# Altium schematic symbol library Centralize.SchLib: 1081 symbols (part 11 of 26)
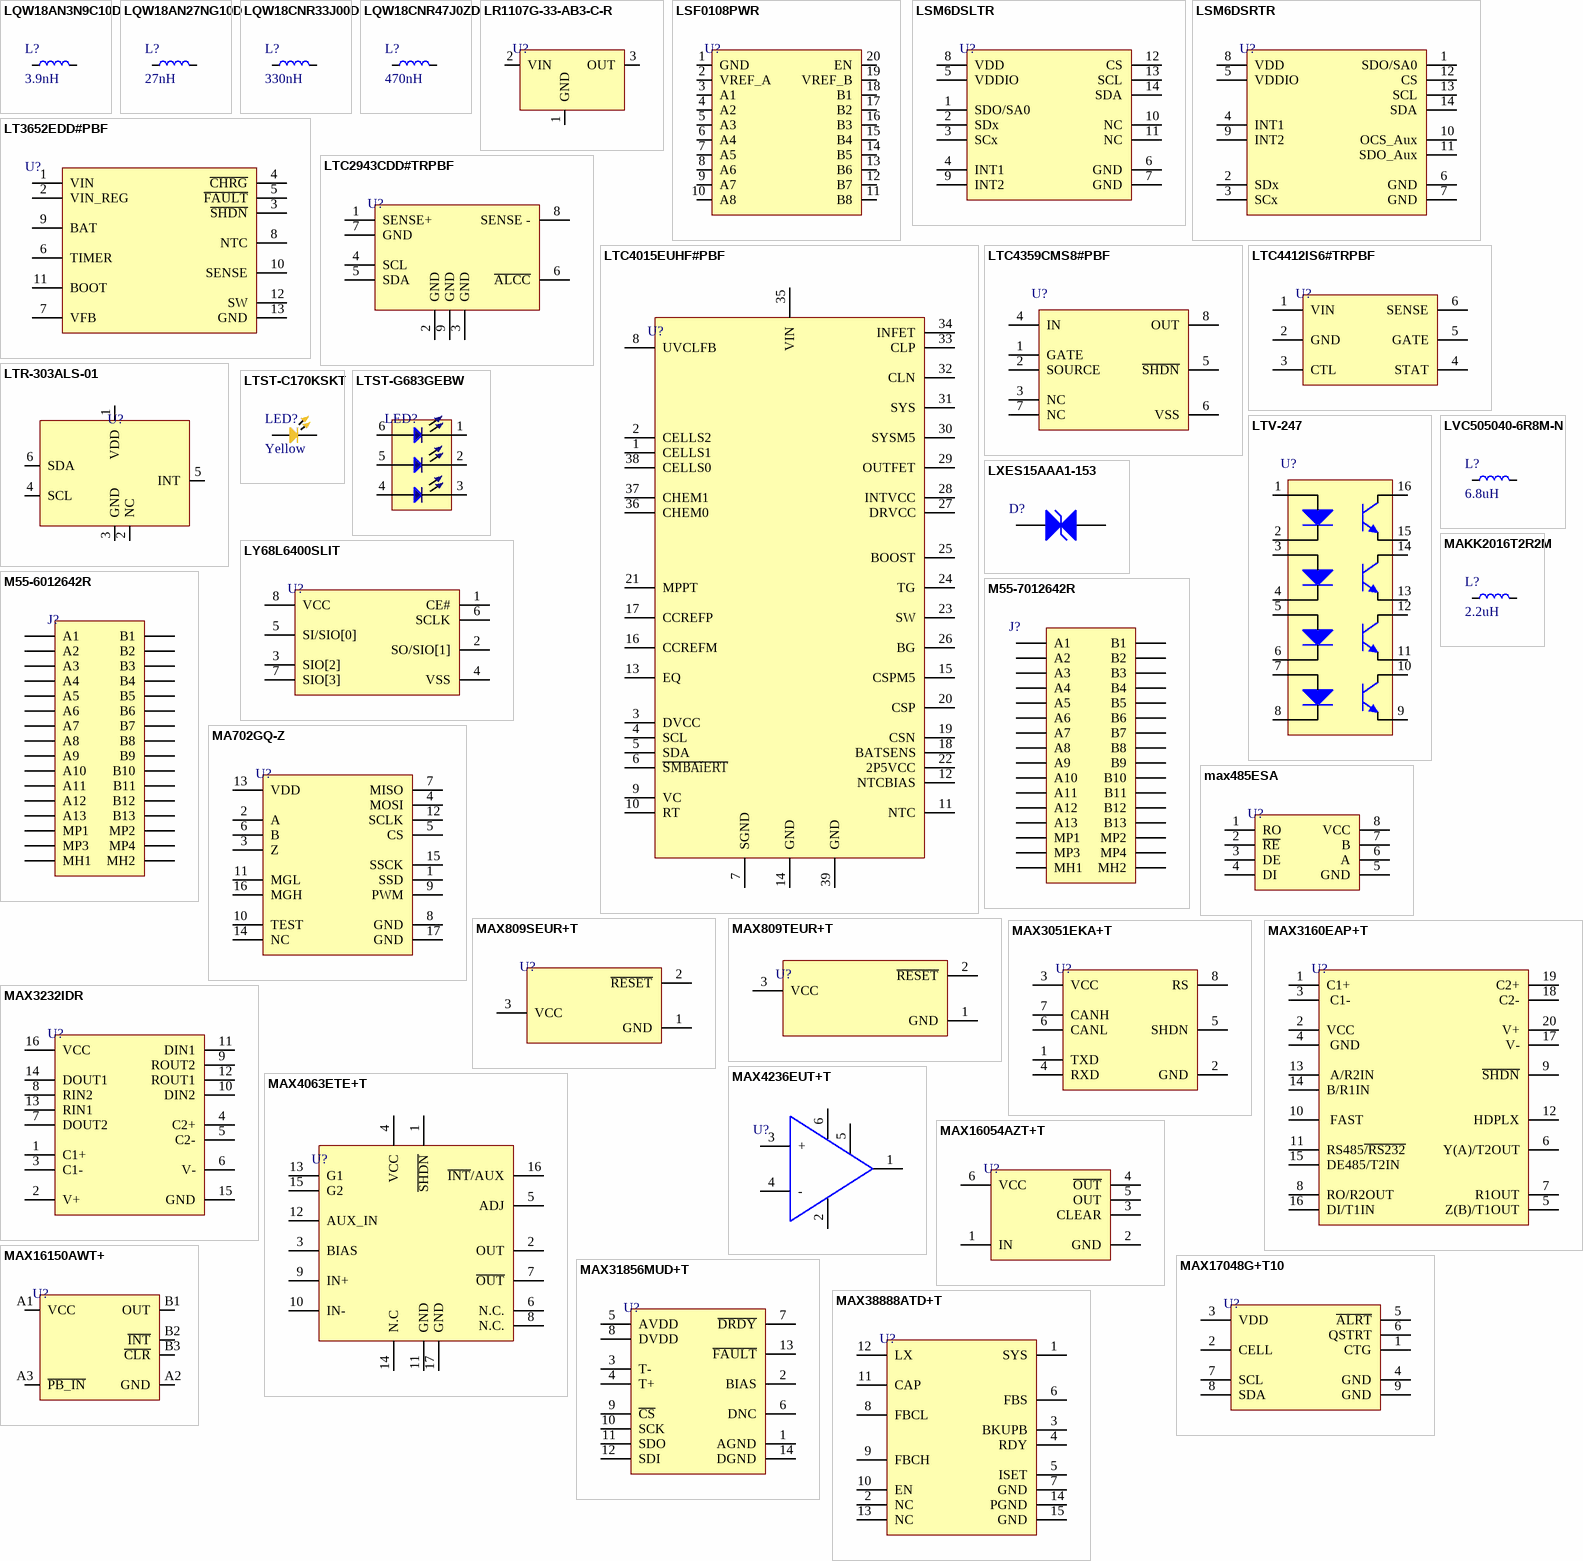
[diagram p57: symbols LQW18AN3N9C10D to MAX38888ATD+T]

## LQW18AN3N9C10D
designator L?, comment 3.9nH
FIXED IND 3.9NH 1A 32 MOHM SMD; Manufacturer: Murata; Manufacturer Part Number: LQW18AN3N9C10D; Core Material: Non-Magnetic; Shielding: Unshielded; Self Resonant Frequency: 11GHz; DC Resistance (DCR): 32mR; Q Factor: 38; Test Frequency: 100MHz; Item Type: Inductor; Supplier 1: RSComponents; RoHS: Yes; Category: Fixed Inductors; Stock 1: 1; Pricing 1: 10=0.16800 (USD); Mount: Surface Mount; Case/Package: 0603; Weight: 0.000106oz; Case Code (Metric): 1608; Case Code (Imperial): 0603; Min Operating Temperature: -55°C; Max Operating Temperature: 125°C; Packaging: Tape and Reel; Inductance: 3.9nH; Package Quantity: 4000; Current Rating: 1A; Resistor Type: Wirewound; Max DC Current: 1A; Termination: SMD/SMT; DC Current: 1A; Series: LQW18A_10; Length: 1.6mm; Width: 0.031inch; Height: 0.8mm; Height - Seated (Max): 0.039inch; Depth: 1.1mm; Radiation Hardening: No; REACH SVHC: No SVHC; Military Standard: Not; RoHS Compliant: Yes; ComponentLink1URL: https://datasheet.ciiva.com/11799/0900766b80a002db-11799288.pdf?src-supplier=RSComponents; ComponentLink1Description: https://datasheet.ciiva.com/11799/0900766b80a002db-11799288.pdf?src-supplier=RSComponents; ComponentLink2URL: https://datasheet.ciiva.com/6705/l0075s0080lqw18a-10-6705579.pdf?src-supplier=Digi-Key; ComponentLink2Description: https://datasheet.ciiva.com/6705/l0075s0080lqw18a-10-6705579.pdf?src-supplier=Digi-Key; ComponentLink3URL: https://datasheet.ciiva.com/6705/l0075s0080lqw18a-10-6705577.pdf?src-supplier=Digi-Key; ComponentLink3Description: https://datasheet.ciiva.com/6705/l0075s0080lqw18a-10-6705577.pdf?src-supplier=Digi-Key; ComponentLink4URL: https://datasheet.ciiva.com/6705/l0075s0080lqw18a-10-6705578.pdf?src-supplier=Digi-Key; ComponentLink4Description: https://datasheet.ciiva.com/6705/l0075s0080lqw18a-10-6705578.pdf?src-supplier=Digi-Key; ComponentLink5URL: https://datasheet.ciiva.com/4976/product-4976636.pdf?src-supplier=Mouser; ComponentLink5Description: https://datasheet.ciiva.com/4976/product-4976636.pdf?src-supplier=Mouser; Supplier Part Number 1: 7242951; LCSC Part Number: C521237
footprint IND-0603 (1608 Metric) (0.063" L x 0.032" W (1.60mm x 0.80mm))
pins: 1, 2

## LQW18AN27NG10D
designator L?, comment 27nH
FIXED IND 27NH 590MA 116MOHM SMD; Manufacturer: Murata; Manufacturer Part Number: LQW18AN27NG10D; Core Material: Non-Magnetic; Tolerance: 2%; DC Resistance (DCR): 116mR; Shielding: Unshielded; Self Resonant Frequency: 2.8GHz; Q Factor: 42; Test Frequency: 100MHz; Item Type: Inductor; Supplier 1: Arrow Electronics; RoHS: Yes; Category: Fixed Inductors; Stock 1: 3528; Pricing 1: 1=0.17550, 10=0.13260, 25=0.13120, 100=0.10470, 250=0.09530, 500=0.08580, 1000=0.07160, 3000=0.06500 (USD); Mount: Surface Mount; Case/Package: 0603; Weight: 0.000106oz; Case Code (Metric): 1608; Case Code (Imperial): 0603; Min Operating Temperature: -55°C; Max Operating Temperature: 125°C; Inductance: 27nH; Packaging: Tape and Reel; Max DC Current: 590mA; Inductance Tolerance: 2%; Package Quantity: 1; Current Rating: 590mA; Resistor Type: Wirewound; Termination: SMD/SMT; DC Current: 590mA; Series: LQW18A_10; Length: 1.6mm; Width: 0.031inch; Height: 0.8mm; Depth: 1.1mm; Height - Seated (Max): 0.039inch; Radiation Hardening: No; Lead Free: Lead Free; Military Standard: Not; Reach SVHC Compliant: Yes; RoHS Compliant: Yes; ComponentLink1URL: https://datasheet.ciiva.com/11799/0900766b80a002db-11799175.pdf?src-supplier=RSComponents; ComponentLink1Description: https://datasheet.ciiva.com/11799/0900766b80a002db-11799175.pdf?src-supplier=RSComponents; ComponentLink2URL: https://datasheet.ciiva.com/6705/l0075s0080lqw18a-10-6705574.pdf?src-supplier=Digi-Key; ComponentLink2Description: https://datasheet.ciiva.com/6705/l0075s0080lqw18a-10-6705574.pdf?src-supplier=Digi-Key; ComponentLink3URL: https://datasheet.ciiva.com/8507/l0075s0080lqw18a-10-8507510.pdf?src-supplier=Avnet; ComponentLink3Description: https://datasheet.ciiva.com/8507/l0075s0080lqw18a-10-8507510.pdf?src-supplier=Avnet; ComponentLink4URL: https://datasheet.ciiva.com/4978/product-4978252.pdf?src-supplier=Mouser; ComponentLink4Description: https://datasheet.ciiva.com/4978/product-4978252.pdf?src-supplier=Mouser; Supplier Part Number 1: LQW18AN27NG10D; LCSC Part Number: C701182
footprint IND-0603 (1608 Metric) (0.063" L x 0.032" W (1.60mm x 0.80mm))
pins: 1, 2

## LQW18CNR33J00D
designator L?, comment 330nH
0603 330nH ±5% DCR=250mΩ 630mA SRF=600MHz; Manufacturer: Murata; Manufacturer Part Number: LQW18CNR33J00D; Core Material: Ferrite; Self Resonant Frequency: 600MHz; Shielding: Unshielded; DC Resistance (DCR): 250mR; Test Frequency: 10MHz; Supplier 1: RSComponents; RoHS: Yes; Category: Fixed Inductors; Stock 1: 440; Pricing 1: 200=0.12100, 500=0.10900, 1000=0.09900, 2000=0.08900 (GBP); Mount: Surface Mount; Case/Package: 0603; Weight: 0.000141oz; Case Code (Metric): 1608; Case Code (Imperial): 0603; Min Operating Temperature: -40°C; Max Operating Temperature: 85°C; Tolerance: 5%; Packaging: Tape and Reel; Package Quantity: 4000; Current Rating: 630mA; Resistor Type: Wirewound; Inductance: 330nH; Max DC Current: 630mA; Termination: SMD/SMT; DC Current: 630mA; Inductance Tolerance: 5%; Series: LQW18C; Length: 0.063inch; Width: 0.031inch; Height: 0.8mm; Height - Seated (Max): 0.037inch; Depth: 0.95mm; REACH SVHC: No SVHC; Military Standard: Not; RoHS Compliant: Yes; ComponentLink1URL: https://datasheet.ciiva.com/8508/l0075s0093lqw18c-8508566.pdf?src-supplier=Avnet; ComponentLink1Description: https://datasheet.ciiva.com/8508/l0075s0093lqw18c-8508566.pdf?src-supplier=Avnet; ComponentLink2URL: https://datasheet.ciiva.com/29691/o05e-29691902.pdf?src-supplier=Digi-Key; ComponentLink2Description: https://datasheet.ciiva.com/29691/o05e-29691902.pdf?src-supplier=Digi-Key; Supplier Part Number 1: 1065371P
footprint IND-0603 (1608 Metric) (0.063" L x 0.032" W (1.60mm x 0.80mm))
pins: 1, 2

## LQW18CNR47J0ZD
designator L?, comment 470nH
FIXED IND 470NH 500MA 450MOHM SM; Manufacturer: Murata; Manufacturer Part Number: LQW18CNR47J0ZD; Core Material: Ferrite; Tolerance: 5%; Shielding: Unshielded; DC Resistance (DCR): 450mR; Self Resonant Frequency: 555MHz; Test Frequency: 10MHz; Item Type: Inductor; Supplier: Digi-Key; Supplier Part Number: 490-LQW18CNR47J0ZDCT-ND; RoHS: Yes; Category: Fixed Inductors; Stock: 4304; Pricing: 1=0.53, 10=0.46, 25=0.4268, 50=0.361, 100=0.3282, 250=0.30856, 500=0.27572, 1000=0.22321 (USD); Mounting Technology: Surface Mount; Case/Package: 0603; Min Operating Temperature: -40°C; Max Operating Temperature: 125°C; Series: LQW18; Value: 470nH; Ratings: AEC-Q200; RoHS Compliant: Yes; ComponentLink1URL: https://search.murata.co.jp/Ceramy/image/img/P02/JELF243A-9145.pdf?src-supplier=Digi-Key; ComponentLink1Description: https://search.murata.co.jp/Ceramy/image/img/P02/JELF243A-9145.pdf?src-supplier=Digi-Key; ComponentLink2URL: https://datasheet.octopart.com/LQW18CNR47J0ZD-Murata-datasheet-150573715.pdf?src-supplier=Newark; ComponentLink2Description: https://datasheet.octopart.com/LQW18CNR47J0ZD-Murata-datasheet-150573715.pdf?src-supplier=Newark; LCSC Part Number: C560039
footprint IND-0603 (1608 Metric) (0.063" L x 0.032" W (1.60mm x 0.80mm))
pins: 1, 2

## LR1107G-33-AB3-C-R
designator U?
600mA 60dB Fixed 3.3V~3.3V Positive 7V SOT-89-3 Linear Voltage Regulators (LDO) ROHS; Manufacturer: UTC(Unisonic Tech); Manufacturer Part Number: LR1107G-33-AB3-C-R; Item Type: IC; Package: SOT-89-3; ComponentLink1Description: LCSC; ComponentLink1URL: https://www.lcsc.com/product-detail/Linear-Voltage-Regulators-LDO_UTC-Unisonic-Tech-LR1107G-33-AB3-C-R_C171498.html; LCSC Part Number: C171498
footprint SOT-89-3
pins: 1 GND, 2 VIN, 3 OUT

## LSF0108PWR
designator U?
IC TRANSLATOR BIDIR 20TSSOP; Manufacturer: Texas Instruments; Manufacturer Part Number: LSF0108PWR; Nominal Supply Current: 1uA; Number of Outputs: 8NUMBER; Supplier: Mouser; Supplier Part Number: 595-LSF0108PWR; RoHS: Yes; Category: Voltage Level Shifters; Stock: 19993; Pricing: 1=1.2, 10=1.03, 50=1.03, 100=0.788, 1000=0.541, 10000=0.479 (USD); Length: 6.5mm; Width: 4.4mm; Height: 1.2mm; Thickness: 1mm; ComponentLink1URL: http://components.arrow.com/part/dataview/66677138S976706N9193?src-supplier=Arrow+Electronics; ComponentLink1Description: http://components.arrow.com/part/dataview/66677138S976706N9193?src-supplier=Arrow+Electronics; ComponentLink2URL: http://www.ti.com/general/docs/lit/getliterature.tsp?genericPartNumber=LSF0101&&fileType=pdf&src-supplier=Avnet; ComponentLink2Description: http://www.ti.com/general/docs/lit/getliterature.tsp?genericPartNumber=LSF0101&&fileType=pdf&src-supplier=Avnet; ComponentLink3URL: http://www.ti.com/lit/ds/symlink/lsf0108.pdf?src-supplier=Digi-Key; ComponentLink3Description: http://www.ti.com/lit/ds/symlink/lsf0108.pdf?src-supplier=Digi-Key; ComponentLink4URL: http://www.ti.com/lit/gpn/lsf0108?src-supplier=Mouser; ComponentLink4Description: http://www.ti.com/lit/gpn/lsf0108?src-supplier=Mouser; LCSC Part Number: C190219; Item Type: IC
footprint TSSOP-20
pins: 1 GND, 2 VREF_A, 3 A1, 4 A2, 5 A3, 6 A4, 7 A5, 8 A6, 9 A7, 10 A8, 11 B8, 12 B7, 13 B6, 14 B5, 15 B4, 16 B3, 17 B2, 18 B1, 19 VREF_B, 20 EN

## LSM6DSLTR
designator U?
IMUACCEL/GYROI2C/SPI14LGA; Manufacturer: STMicroelectronics; Manufacturer Part Number: LSM6DSLTR; Sensor Type: Accelerometer,Gyroscope,3 Axis,Temperature; Output Type: SPI,I2C; Item Type: IC; Supplier 1: Digi-Key; RoHS: Yes; Category: Inertial Measurement Units (IMUs); Stock 1: 17790; Pricing 1: 1=6.37000, 10=5.72400, 25=5.41120, 100=4.68960, 250=4.44912, 500=3.99218, 1000=3.97040 (USD); Mount: Surface Mount; Case/Package: LGA; Min Operating Temperature: -40°C; Max Operating Temperature: 85°C; Packaging: Tape and Reel; RoHS Compliant: Yes; ComponentLink1URL: http://www.farnell.com/datasheets/2290668.pdf?src-supplier=Farnell; ComponentLink1Description: http://www.farnell.com/datasheets/2290668.pdf?src-supplier=Farnell; ComponentLink2URL: https://www.mouser.com/ds/2/389/lsm6dsl-973708.pdf?src-supplier=Mouser; ComponentLink2Description: https://www.mouser.com/ds/2/389/lsm6dsl-973708.pdf?src-supplier=Mouser; ComponentLink3URL: http://www.farnell.com/datasheets/2290668.pdf?src-supplier=Newark; ComponentLink3Description: http://www.farnell.com/datasheets/2290668.pdf?src-supplier=Newark; ComponentLink4URL: http://www.farnell.com/datasheets/2290668.pdf?src-supplier=Element14; ComponentLink4Description: http://www.farnell.com/datasheets/2290668.pdf?src-supplier=Element14; ComponentLink5URL: http://www.st.com/content/ccc/resource/technical/document/datasheet/ee/23/a0/dc/1d/68/45/52/DM00237456.pdf/files/DM00237456.pdf/jcr:content/translations/en.DM00237456.pdf?src-supplier=Digi-Key; ComponentLink5Description: http://www.st.com/content/ccc/resource/technical/document/datasheet/ee/23/a0/dc/1d/68/45/52/DM00237456.pdf/files/DM00237456.pdf/jcr:content/translations/en.DM00237456.pdf?src-supplier=Digi-Key; LCSC Part Number: C126672; Supplier Part Number 1: 497-16705-1-ND
footprint 14-LGA (2.5x3)
pins: 1 SDO/SA0, 2 SDx, 3 SCx, 4 INT1, 5 VDDIO, 6 GND, 7 GND, 8 VDD, 9 INT2, 10 NC, 11 NC, 12 CS, 13 SCL, 14 SDA

## LSM6DSRTR
designator U?
INEMO INERTIAL MODULE: 3D ACCELE; Manufacturer: STMicroelectronics; Manufacturer Part Number: LSM6DSRTR; Item Type: IC; Supplier 1: Newark; RoHS: Yes; Category: Inertial Measurement Units (IMUs); RoHS Compliant: Yes; ComponentLink1URL: https://www.st.com/resource/en/datasheet/lsm6dsr.pdf?src-supplier=Digi-Key; ComponentLink1Description: https://www.st.com/resource/en/datasheet/lsm6dsr.pdf?src-supplier=Digi-Key; Supplier Part Number 1: 03AH2347; LCSC Part Number: C784817
footprint 14-LGA (2.5x3)
pins: 1 SDO/SA0, 2 SDx, 3 SCx, 4 INT1, 5 VDDIO, 6 GND, 7 GND, 8 VDD, 9 INT2, 10 OCS_Aux, 11 SDO_Aux, 12 CS, 13 SCL, 14 SDA

## LT3652EDD#PBF
designator U?
Battery Charger Li-Ion 2000mA 4.2V Automotive 12-Pin DFN EP; Manufacturer: Analog Devices / Linear Technology; Manufacturer Part Number: LT3652EDD#PBF; Max Supply Voltage: 32V; Min Supply Voltage: 4.95V; Output Current: 2mA; Max Output Current: 2A; ComponentLink1URL: http://www.mouser.com/ds/2/445/7447779122-538892.pdf?src-supplier=Mouser; ComponentLink1Description: http://www.mouser.com/ds/2/445/7447779122-538892.pdf?src-supplier=Mouser; ComponentLink2URL: http://katalog.we-online.de/pbs/datasheet/7447779122.pdf?src-supplier=Digi-Key; ComponentLink2Description: http://katalog.we-online.de/pbs/datasheet/7447779122.pdf?src-supplier=Digi-Key; Supplier 1: Digi-Key; RoHS: Yes; Category: Battery Management; Stock 1: 1554; Pricing 1: 1=7.32000, 10=6.60900, 25=6.30160, 100=5.47170, 250=5.22580, 500=4.76470, 1000=4.35000 (USD); Mount: Surface Mount; Case/Package: DFN; Number of Pins: 12; Min Operating Temperature: -40°C; Max Operating Temperature: 125°C; Package Quantity: 121; Packaging: Rail/Tube; Series: -; Output Voltage: 4.2V; Max Output Voltage: 4.2V; Max Charge Current: 2A; Length: 3mm; Width: 3mm; Height: 0.7mm; Radiation Hardening: No; REACH SVHC: No SVHC; RoHS Compliant: Yes; ComponentLink3URL: https://datasheet.ciiva.com/1138/1692510-1138257.pdf?src-supplier=Element14; ComponentLink3Description: https://datasheet.ciiva.com/1138/1692510-1138257.pdf?src-supplier=Element14; ComponentLink4URL: https://datasheet.ciiva.com/14093/lt3652-eng-ds-14093922.pdf?src-supplier=Distrelec; ComponentLink4Description: https://datasheet.ciiva.com/14093/lt3652-eng-ds-14093922.pdf?src-supplier=Distrelec; ComponentLink5URL: https://datasheet.ciiva.com/15114/getdatasheetpartid-368876-15114676.pdf?src-supplier=Verical; ComponentLink5Description: https://datasheet.ciiva.com/15114/getdatasheetpartid-368876-15114676.pdf?src-supplier=Verical; ComponentLink6URL: https://datasheet.ciiva.com/30477/0900766b812525a8-30477820.pdf?src-supplier=RSComponents; ComponentLink6Description: https://datasheet.ciiva.com/30477/0900766b812525a8-30477820.pdf?src-supplier=RSComponents; ComponentLink7URL: https://datasheet.ciiva.com/1144/3652fd-1144158.pdf?src-supplier=Newark; ComponentLink7Description: https://datasheet.ciiva.com/1144/3652fd-1144158.pdf?src-supplier=Newark; ComponentLink8URL: https://datasheet.ciiva.com/26874/lt3652edd-pbf-26874578.pdf?src-supplier=IIIC; ComponentLink8Description: https://datasheet.ciiva.com/26874/lt3652edd-pbf-26874578.pdf?src-supplier=IIIC; ComponentLink9URL: https://datasheet.ciiva.com/1496/1692510-1496793.pdf?src-supplier=Farnell; ComponentLink9Description: https://datasheet.ciiva.com/1496/1692510-1496793.pdf?src-supplier=Farnell; ComponentLink10URL: https://datasheet.ciiva.com/22642/1684150-22642988.pdf?src-supplier=Element14; ComponentLink10Description: https://datasheet.ciiva.com/22642/1684150-22642988.pdf?src-supplier=Element14; ComponentLink11URL: https://datasheet.ciiva.com/22647/1692510-22647788.pdf?src-supplier=Farnell; ComponentLink11Description: https://datasheet.ciiva.com/22647/1692510-22647788.pdf?src-supplier=Farnell; ComponentLink12URL: https://datasheet.ciiva.com/1932/28522-1932094.pdf?src-supplier=Digi-Key; ComponentLink12Description: https://datasheet.ciiva.com/1932/28522-1932094.pdf?src-supplier=Digi-Key; Supplier Part Number 1: LT3652EDD#PBF-ND; LCSC Part Number: C96510
footprint 12-DFN (3x3)
pins: 1 VIN, 2 VIN_REG, 3 ~{SHDN}, 4 ~{CHRG}, 5 ~{FAULT}, 6 TIMER, 7 VFB, 8 NTC, 9 BAT, 10 SENSE, 11 BOOT, 12 SW, 13 GND

## LTC2943CDD#TRPBF
designator U?
IC GAS GAUGE MULTICELL 8DFN; Manufacturer: Analog Devices / Linear Technology; Manufacturer Part Number: LTC2943CDD#TRPBF; Interface: I2C; Supplier 1: Digi-Key; RoHS: Yes; Category: Battery Management; Stock 1: 8712; Pricing 1: 1=6.36000, 10=5.74300, 25=5.47600, 100=4.75470, 250=4.54104, 500=4.14036, 1000=3.78000 (USD); Case/Package: DFN; Number of Pins: 8; Min Operating Temperature: 0°C; Max Operating Temperature: 70°C; Packaging: Tape and Reel; RoHS Compliant: Yes; ComponentLink1URL: https://datasheet.ciiva.com/29609/44018-29609856.pdf?src-supplier=Digi-Key; ComponentLink1Description: https://datasheet.ciiva.com/29609/44018-29609856.pdf?src-supplier=Digi-Key; Supplier Part Number 1: LTC2943CDD#TRPBFCT-ND; LCSC Part Number: C683662; Item Type: IC
footprint 8-DFN (3x3)
pins: 1 SENSE+, 2 GND, 3 GND, 4 SCL, 5 SDA, 6 ~{ALCC}, 7 GND, 8 SENSE -, 9 GND

## LTC4015EUHF#PBF
designator U?
IC BATT CHG MULT-CHEM 2CEL 38QFN; Manufacturer: Analog Devices / Linear Technology; Manufacturer Part Number: LTC4015EUHF#PBF; Number of Cells: 2; Max Supply Voltage: 35V; Interface: I2C; Max Charge Current: 20A; Fault Protection: Over Temperature; Supplier 1: Mouser; RoHS: Yes; Category: Battery Management; Stock 1: 4617; Pricing 1: 1=13.35000, 10=12.28000, 50=11.77000, 100=11.77000, 1000=10.36000, 10000=10.36000 (USD); Case/Package: QFN; Number of Pins: 38; Min Operating Temperature: -40°C; Max Operating Temperature: 125°C; Packaging: Rail/Tube; Series: PowerPath™; Reach SVHC Compliant: Yes; RoHS Compliant: Yes; ComponentLink1URL: http://www.farnell.com/datasheets/2300511.pdf?src-supplier=Farnell; ComponentLink1Description: http://www.farnell.com/datasheets/2300511.pdf?src-supplier=Farnell; ComponentLink2URL: http://www.analog.com/media/en/technical-documentation/data-sheets/4015fb.pdf?src-supplier=Digi-Key; ComponentLink2Description: http://www.analog.com/media/en/technical-documentation/data-sheets/4015fb.pdf?src-supplier=Digi-Key; ComponentLink3URL: http://www.farnell.com/datasheets/2034976.pdf?src-supplier=Element14; ComponentLink3Description: http://www.farnell.com/datasheets/2034976.pdf?src-supplier=Element14; Supplier Part Number 1: 584-LTC4015EUHF#PBF; Item Type: IC; LCSC Part Number: C580823
footprint 38-QFN (5x7)
footprint 38-QFN (5x7)
pins: 1 CELLS1, 2 CELLS2, 3 DVCC, 4 SCL, 5 SDA, 6 ~{SMBAǐERT}, 7 SGND, 8 UVCLFB, 9 VC, 10 RT, 11 NTC, 12 NTCBIAS, 13 EQ, 14 GND, 15 CSPM5, 16 CCREFM, 17 CCREFP, 18 BATSENS, 19 CSN, 20 CSP, 21 MPPT, 22 2P5VCC, 23 SW, 24 TG, 25 BOOST, 26 BG, 27 DRVCC, 28 INTVCC, 29 OUTFET, 30 SYSM5, 31 SYS, 32 CLN, 33 CLP, 34 INFET, 35 VIN, 36 CHEM0, 37 CHEM1, 38 CELLS0, 39 GND

## LTC4359CMS8#PBF
designator U?
Ideal Diode Controller MSOP-8; Manufacturer: Analog Devices / Linear Technology; Manufacturer Part Number: LTC4359CMS8#PBF; Item Type: IC; Package: MSOP-8; ComponentLink1URL: https://www.lcsc.com/product-detail/Power-Distribution-Switches_Analog-Devices-LTC4359CMS8-PBF_C190259.html; ComponentLink1Description: LCSC; LCSC Part Number: C190259
footprint 8-MSOP (0.118", 3.00mm Width)
pins: 1 GATE, 2 SOURCE, 3 NC, 4 IN, 5 ~{SHDN}, 6 VSS, 7 NC, 8 OUT

## LTC4412IS6#TRPBF
designator U?
IC OR CTRLR SRC SELECT TSOT23-6; Manufacturer: Analog Devices / Linear Technology; Manufacturer Part Number: LTC4412IS6#TRPBF; Turn-On Delay Time: 110us; Turn-Off Delay Time: 13us; Operating Supply Current: 15uA; Supplier 1: Digi-Key; RoHS: Yes; Category: Uncategorized; Stock 1: 2608; Pricing 1: 1=3.90000, 10=3.50700, 25=3.31520, 100=2.87310, 250=2.72580, 500=2.44584, 1000=2.08500 (USD); Case/Package: SOT-23-6; Number of Pins: 6; Min Operating Temperature: -40°C; Max Operating Temperature: 85°C; Package Quantity: 2500; Packaging: Tape and Reel; Series: PowerPath™; Length: 2.9mm; RoHS Compliant: Yes; ComponentLink1URL: https://datasheet.ciiva.com/1960/1527-1960891.pdf?src-supplier=Digi-Key; ComponentLink1Description: https://datasheet.ciiva.com/1960/1527-1960891.pdf?src-supplier=Digi-Key; Supplier Part Number 1: LTC4412IS6#TRPBFCT-ND; LCSC Part Number: C521306; Item Type: IC
footprint SOT-23-6
pins: 1 VIN, 2 GND, 3 CTL, 4 STAT, 5 GATE, 6 SENSE

## LTR-303ALS-01
designator U?
SENSOR OPT AMBIENT 6DFN; Manufacturer: Vishay Lite-On; Manufacturer Part Number: LTR-303ALS-01; Output Type: I2C; Item Type: Ambient Light Sensor; Supplier 1: Arrow Electronics; RoHS: Yes; Category: Uncategorized; Stock 1: 1717; Pricing 1: 1=0.5742, 10=0.465, 25=0.4604, 100=0.394, 250=0.39, 500=0.3741, 1000=0.3355 (USD); Mounting Technology: Surface Mount; Case/Package: DFN; Pins: 6; Min Operating Temperature: -30°C; Max Operating Temperature: 70°C; Packaging: Cut Tape; Series: -; RoHS Compliant: Yes; ComponentLink1URL: http://optoelectronics.liteon.com/upload/download/DS86-2013-0004/LTR-303ALS-01_DS_V1.pdf?src-supplier=Digi-Key; ComponentLink1Description: http://optoelectronics.liteon.com/upload/download/DS86-2013-0004/LTR-303ALS-01_DS_V1.pdf?src-supplier=Digi-Key; ComponentLink2URL: http://optoelectronics.liteon.com/upload/download/DS86-2013-0004/P_100_LTR-303ALS-01%20DS.pdf?src-supplier=Avnet; ComponentLink2Description: http://optoelectronics.liteon.com/upload/download/DS86-2013-0004/P_100_LTR-303ALS-01%20DS.pdf?src-supplier=Avnet; Supplier Part Number 1: LTR-303ALS-01; LCSC Part Number: C364577
footprint 6-Pin ChipLED (SENSOR OPT AMBIENT 6DFN)
pins: 1 VDD, 2 NC, 3 GND, 4 SCL, 5 INT, 6 SDA

## LTST-C170KSKT
designator LED?, comment Yellow
LED YELLOW CLEAR SMD; Manufacturer: Vishay Lite-On; Manufacturer Part Number: LTST-C170KSKT; Lens Color: Colorless; Forward Voltage: 2.4V; Forward Current: 30mA; Luminous Intensity: 112mcd; Viewing Angle: 130°; Lens Style: Diffused,Colorless,Rectangular,Clear; Power Rating: 75mW; Dominant Wavelength: 587nm; Test Current: 20mA; Number of Elements: 1; Wavelength: 588nm; Reverse Voltage: 5V; Supplier 1: Digi-Key; RoHS: Yes; Category: LEDs; Stock 1: 4224; Pricing 1: 1=0.31000, 10=0.16900, 100=0.07860, 500=0.07260, 1000=0.05687 (USD); Mount: Surface Mount; Case/Package: 0805; Number of Pins: 2; Color: Yellow; Case Code (Metric): 2012; Case Code (Imperial): 0805; Min Operating Temperature: -55°C; Max Operating Temperature: 85°C; Packaging: Tape and Reel; Package Quantity: 1; Illumination Color: Yellow; Lens Transparency: Clear; Power Dissipation: 75mW; Number of LEDs: 1; Series: CHIPLED 0805; Length: 2mm; Width: 1.25mm; Height: 1.1mm; Depth: 1.25mm; Radiation Hardening: No; Lead Free: Lead Free; RoHS Compliant: Yes; ComponentLink1URL: https://datasheet.ciiva.com/11774/0900766b80dc027c-11774116.pdf?src-supplier=RSComponents; ComponentLink1Description: https://datasheet.ciiva.com/11774/0900766b80dc027c-11774116.pdf?src-supplier=RSComponents; ComponentLink2URL: https://datasheet.ciiva.com/12400/lite-on-ltst-c170kskt-187240-12400806.pdf?src-supplier=Mouser; ComponentLink2Description: https://datasheet.ciiva.com/12400/lite-on-ltst-c170kskt-187240-12400806.pdf?src-supplier=Mouser; ComponentLink3URL: https://datasheet.ciiva.com/16203/ltst-c170kskt-16203829.pdf?src-supplier=Future+Electronics; ComponentLink3Description: https://datasheet.ciiva.com/16203/ltst-c170kskt-16203829.pdf?src-supplier=Future+Electronics; ComponentLink4URL: https://datasheet.ciiva.com/15118/getdatasheetpartid-214541-15118098.pdf?src-supplier=Verical; ComponentLink4Description: https://datasheet.ciiva.com/15118/getdatasheetpartid-214541-15118098.pdf?src-supplier=Verical; ComponentLink5URL: https://datasheet.ciiva.com/2110/s-110-ltst-c170kskt-2110046.pdf?src-supplier=Digi-Key; ComponentLink5Description: https://datasheet.ciiva.com/2110/s-110-ltst-c170kskt-2110046.pdf?src-supplier=Digi-Key; ComponentLink6URL: https://datasheet.ciiva.com/2110/s-110-ltst-c170kskt-2110045.pdf?src-supplier=Digi-Key; ComponentLink6Description: https://datasheet.ciiva.com/2110/s-110-ltst-c170kskt-2110045.pdf?src-supplier=Digi-Key; ComponentLink7URL: https://datasheet.ciiva.com/2110/s-110-ltst-c170kskt-2110047.pdf?src-supplier=Digi-Key; ComponentLink7Description: https://datasheet.ciiva.com/2110/s-110-ltst-c170kskt-2110047.pdf?src-supplier=Digi-Key; Supplier Part Number 1: 160-1416-1-ND; LCSC Part Number: C125091; Item Type: LED
footprint LED-0805
pins: 1, 2

## LTST-G683GEBW
designator LED?
Standard LEDs - SMD SMD LED Red/Grn/Blue 625/1550/260 mcd; Manufacturer: Vishay Lite-On; Manufacturer Part Number: LTST-G683GEBW; Color: Blue,Green,Red; Luminous Intensity: 267.5mcd; Viewing Angle: 120°; Lens Style: Diffused,Circular; Forward Voltage: 3.8V; Forward Current: 20mA; Lens Transparency: Diffused; Dominant Wavelength: 525nm; Number of Elements: 3; Reverse Voltage: 5V; Supplier 1: Mouser; RoHS: Yes; Category: LEDs; Stock 1: 43790; Pricing 1: 1=0.51000, 10=0.46000, 50=0.46000, 100=0.34600, 500=0.29900, 1000=0.23600, 2000=0.21200, 10000=0.20900, 24000=0.20400, 50000=0.19700 (USD); Mount: Surface Mount; Case/Package: PLCC; Number of Pins: 6; Min Operating Temperature: -40°C; Max Operating Temperature: 85°C; Packaging: Tape and Reel; Package Quantity: 2000; Test Current: 20mA; Number of LEDs: 3; Series: -; Length: 3.3mm; Width: 3mm; Height: 1.45mm; Depth: 3.2mm; Radiation Hardening: No; Lead Free: Lead Free; RoHS Compliant: Yes; ComponentLink1URL: https://datasheet.ciiva.com/2959/s-110-ltst-g683gebw-2959963.pdf?src-supplier=Digi-Key; ComponentLink1Description: https://datasheet.ciiva.com/2959/s-110-ltst-g683gebw-2959963.pdf?src-supplier=Digi-Key; ComponentLink2URL: https://datasheet.ciiva.com/12403/s-110-ltst-g683gebw-337108-12403142.pdf?src-supplier=Mouser; ComponentLink2Description: https://datasheet.ciiva.com/12403/s-110-ltst-g683gebw-337108-12403142.pdf?src-supplier=Mouser; Supplier Part Number 1: 859-LTST-G683GEBW; LCSC Part Number: C575501
footprint LTST-G683GEBW
pins: 1 -, 2 -, 3 -, 4 +, 5 +, 6 +

## LTV-247
designator U?
OPTOISO 3.75KV 4CH TRANS 16SO; Manufacturer: Vishay Lite-On; Manufacturer Part Number: LTV-247; Number of Channels: 4; Collector Emitter Voltage (VCEO): 80V; Reverse Breakdown Voltage: 6V; Forward Voltage: 1.2V; Forward Current: 20mA; Max Power Dissipation: 200mW; Output Current per Channel: 50mA; Collector Emitter Saturation Voltage: 400mV; Power Dissipation: 170mW; Current Transfer Ratio: 600%; Item Type: PhotoTransistor; Supplier 1: Future Electronics; RoHS: Yes; Category: Optocouplers; Stock 1: 178000; Pricing 1: 2000=0.77000 (USD); Mount: Surface Mount; Case/Package: SMD/SMT; Number of Pins: 16; Min Operating Temperature: -55°C; Max Operating Temperature: 110°C; Package Quantity: 2000; Packaging: Tape and Reel; Max Output Voltage: 80V; Max Collector Current: 50mA; Number of Elements: 4; Max Input Current: 50mA; Radiation Hardening: No; RoHS Compliant: Yes; ComponentLink1URL: https://datasheet.ciiva.com/24015/ltv-247-256860-24015561.pdf?src-supplier=Mouser; ComponentLink1Description: https://datasheet.ciiva.com/24015/ltv-247-256860-24015561.pdf?src-supplier=Mouser; ComponentLink2URL: https://datasheet.ciiva.com/29730/ltv-214-244-29730320.pdf?src-supplier=Digi-Key; ComponentLink2Description: https://datasheet.ciiva.com/29730/ltv-214-244-29730320.pdf?src-supplier=Digi-Key; Supplier Part Number 1: 3051235; LCSC Part Number: C115451; ComponentLink3Description: LCSC; ComponentLink3URL: https://www.lcsc.com/product-detail/Optocouplers-Phototransistor-Output_Lite-On-LTV-247_C115451.html
footprint 16-SO
pins: 1 A, 2 K, 3 A, 4 K, 5 A, 6 K, 7 A, 8 K, 9 E, 10 C, 11 E, 12 C, 13 E, 14 C, 15 E, 16 C

## LVC505040-6R8M-N
designator L?, comment 6.8uH
2.7A 6.8uH ±20% 50mΩ SMD Power Inductors ROHS; Manufacturer Part Number: LVC505040-6R8M-N; Manufacturer: Chlisin Elec; ComponentLink1Description: LCSC; ComponentLink1URL: https://www.lcsc.com/product-detail/Power-Inductors_Chilisin-Elec-LVC505040-6R8M-N_C285870.html; Value: 6.8uH; Footprint: Custom; LCSC Part Number: C285870; Item Type: Inductor
footprint LVC505040-6R8M-N_
pins: 1, 2

## LXES15AAA1-153
designator D?
0402 TVS ROHS; Manufacturer: Leiditech; Manufacturer Part Number: LXES15AAA1-153; Item Type: TVS Diode; Package: 0402; LCSC Part Number: C5210978; ComponentLink1Description: LCSC; ComponentLink1URL: https://www.lcsc.com/product-detail/TVS_Leiditech-LXES15AAA1-153_C5210978.html
footprint Diode 0402
pins: 1 A, 2 A

## LY68L6400SLIT
designator U?
SOP-8_150mil SRAM ROHS; Manufacturer: Lyontek Inc; Manufacturer Part Number: LY68L6400SLIT; LCSC Part Number: C261881; ComponentLink1Description: LCSC; ComponentLink1URL: https://lcsc.com/product-detail/RAM_Lyontek-Inc-LY68L6400SLIT_C261881.html
footprint SOP-8
pins: 1 CE#, 2 SO/SIO[1], 3 SIO[2], 4 VSS, 5 SI/SIO[0], 6 SCLK, 7 SIO[3], 8 VCC

## M55-6012642R
designator J?
CONN RCPT 26POS 0.05 GOLD SMD; Manufacturer: Harwin; Manufacturer Part Number: M55-6012642R; Supplier 1: Digi-Key; RoHS: Yes; Category: Connectors; Stock 1: 320; Pricing 1: 1=2.50000, 10=2.17600, 100=1.94480 (USD); RoHS Compliant: Yes; Supplier Part Number 1: 952-3846-1-ND
footprint M55-6012642R
pins: A1, A2, A3, A4, A5, A6, A7, A8, A9, A10, A11, A12, A13, B1, B2, B3, B4, B5, B6, B7, B8, B9, B10, B11, B12, B13, MH1, MH2, MP1, MP2, MP3, MP4

## M55-7012642R
designator J?
CONN HEADER SMD 26POS 1.27MM; Manufacturer: Harwin; Manufacturer Part Number: M55-7012642R; Supplier 1: Digi-Key; RoHS: Yes; Category: Connectors; Stock 1: 384; Pricing 1: 1=1.43000, 10=1.24900, 100=1.11570 (USD); RoHS Compliant: Yes; Supplier Part Number 1: 952-3878-1-ND
footprint M55-7012642R
pins: A1, A2, A3, A4, A5, A6, A7, A8, A9, A10, A11, A12, A13, B1, B2, B3, B4, B5, B6, B7, B8, B9, B10, B11, B12, B13, MH1, MH2, MP1, MP2, MP3, MP4

## MA702GQ-Z
designator U?
SENSOR ANGLE SMD; Manufacturer: Monolithic Power Systems; Manufacturer Part Number: MA702GQ-Z; Sensing Method: Hall Effect; Frequency: 26MHz; Frequency Stability: 10ppm; Max Supply Current: 7mA; Item Type: Position Sensor; Supplier 1: Avnet; RoHS: Yes; Stock 1: 110000; Pricing 1: 5000=3.15000, 10000=2.97500, 20000=2.80000, 30000=2.62500, 40000=2.45000 (USD); Mount: Surface Mount; Case/Package: QFN; Min Operating Temperature: -40°C; Max Operating Temperature: 85°C; Packaging: Tape and Reel; Termination: SMD/SMT; RoHS Compliant: Yes; ComponentLink1URL: https://www.monolithicpower.com/pub/media/document/m/a/ma702_r1.0.pdf?src-supplier=Digi-Key; ComponentLink1Description: https://www.monolithicpower.com/pub/media/document/m/a/ma702_r1.0.pdf?src-supplier=Digi-Key; Supplier Part Number 1: MA702GQ-Z
footprint 16-QFN (3x3).
pins: 1 SSD, 2 A, 3 Z, 4 MOSI, 5 CS, 6 B, 7 MISO, 8 GND, 9 PWM, 10 TEST, 11 MGL, 12 SCLK, 13 VDD, 14 NC, 15 SSCK, 16 MGH, 17 GND

## MAKK2016T2R2M
designator L?, comment 2.2uH
FIXED IND 2.2UH 1.5A 160MOHM SMD; Manufacturer: Taiyo Yuden; Manufacturer Part Number: MAKK2016T2R2M; Core Material: Metal; Tolerance: 20%; Shielding: Shielded; DC Resistance (DCR): 160mR; Test Frequency: 2MHz; Item Type: Inductor; Supplier 1: Mouser; RoHS: Yes; Category: Fixed Inductors; Stock 1: 64320; Pricing 1: 1=0.27000, 10=0.17200, 50=0.17200, 100=0.14000, 1000=0.10600, 10000=0.09200 (USD); Mount: Surface Mount; Case/Package: 0806; Case Code (Metric): 2016; Case Code (Imperial): 0806; Min Operating Temperature: -40°C; Max Operating Temperature: 105°C; Packaging: Tape and Reel; Package Quantity: 3000; Resistor Type: Wirewound; Inductance: 2.2uH; Current Rating: 1.5A; Saturation Current: 1.5A; Max DC Current: 1.5A; Termination: SMD/SMT; Length: 0.079inch; Width: 0.063inch; Height: 1mm; Height - Seated (Max): 0.039inch; Depth: 1.6mm; Radiation Hardening: No; Halogen Free: Halogen Free; RoHS Compliant: Yes; ComponentLink1URL: https://datasheet.ciiva.com/30014/makk2016t2r2m-ss-30014449.pdf?src-supplier=Avnet; ComponentLink1Description: https://datasheet.ciiva.com/30014/makk2016t2r2m-ss-30014449.pdf?src-supplier=Avnet; Supplier Part Number 1: 963-MAKK2016T2R2M; LCSC Part Number: C92923
footprint MAKK2016T2R2M_
pins: 1, 2

## max485ESA
designator U?
transceiver 2.5Mbps 1/1 SOP-8 RS-485/RS-422 ICs ROHS; Manufacturer: JSMSEMI; Manufacturer Part Number: max485ESA; Item Type: IC; Package: SOP-8; LCSC Part Number: C2687394; ComponentLink1Description: LCSC; ComponentLink1URL: https://www.lcsc.com/product-detail/RS-span-style-background-color-ff0-485-span-RS-422-ICs_JSMSEMI-max485ESA_C2687394.html
footprint SOP-8
pins: 1 RO, 2 ~{RE}, 3 DE, 4 DI, 5 GND, 6 A, 7 B, 8 VCC

## MAX809SEUR+T
designator U?
IC MPU/RESET CIRC SOT23-3; Manufacturer: Maxim; Manufacturer Part Number: MAX809SEUR+T; Min Supply Voltage: 1.2V; Max Supply Voltage: 5.5V; Max Power Dissipation: 320mW; Number of Voltages Monitored: 1; Reset: Active Low; Reset Timeout: 140ms; Threshold Voltage: 2.93V; Watchdog Timer: No; Min Reset Threshold Voltage: 2.89V; Max Reset Threshold Voltage: 2.96V; Output: TOTEM-POLE; Operating Supply Current: 60uA; Max Output Current: 20mA; Nominal Supply Current: 17uA; Output Type: PUSH-PULL; Supplier 1: Mouser; RoHS: Yes; Category: Voltage Supervisors; Stock 1: 26180; Pricing 1: 1=3.68000, 10=3.31000, 25=3.13000, 50=3.13000, 100=2.72000, 250=2.58000, 500=2.31000, 1000=2.09000, 10000=2.01000 (USD); Mount: Surface Mount; Case/Package: SOT-23; Number of Pins: 3; Min Operating Temperature: -40°C; Max Operating Temperature: 105°C; Type: Simple Reset/Power-On Reset; Packaging: Cut Tape; Package Quantity: 1; Series: -; Overvoltage Threshold: 2.96V; Undervoltage Threshold: 2.89V; Termination: SMD/SMT; Power Dissipation: 320mW; Length: 2.92mm; Width: 1.3mm; Height: 0.94mm; Radiation Hardening: No; Lead Free: Lead Free; RoHS Compliant: Yes; REACH SVHC: No SVHC; ComponentLink1URL: https://datasheet.ciiva.com/1169/max803-max810z-1169879.pdf?src-supplier=Element14; ComponentLink1Description: https://datasheet.ciiva.com/1169/max803-max810z-1169879.pdf?src-supplier=Element14; ComponentLink2URL: https://datasheet.ciiva.com/1169/max803-max810z-1169878.pdf?src-supplier=Element14; ComponentLink2Description: https://datasheet.ciiva.com/1169/max803-max810z-1169878.pdf?src-supplier=Element14; ComponentLink3URL: https://datasheet.ciiva.com/14226/max803-max810z-14226330.pdf?src-supplier=Avnet; ComponentLink3Description: https://datasheet.ciiva.com/14226/max803-max810z-14226330.pdf?src-supplier=Avnet; ComponentLink4URL: https://datasheet.ciiva.com/1973/max803-max810z-1973322.pdf?src-supplier=Digi-Key; ComponentLink4Description: https://datasheet.ciiva.com/1973/max803-max810z-1973322.pdf?src-supplier=Digi-Key; ComponentLink5URL: https://datasheet.ciiva.com/1973/max803-max810z-1973323.pdf?src-supplier=Digi-Key; ComponentLink5Description: https://datasheet.ciiva.com/1973/max803-max810z-1973323.pdf?src-supplier=Digi-Key; ComponentLink6URL: https://datasheet.ciiva.com/1973/max803-max810z-1973321.pdf?src-supplier=Digi-Key; ComponentLink6Description: https://datasheet.ciiva.com/1973/max803-max810z-1973321.pdf?src-supplier=Digi-Key; Supplier Part Number 1: 700-MAX809SEURT; LCSC Part Number: C7270; Item Type: IC
footprint SOT-23 (TRANS NPN 40V 0.6A SOT23)
pins: 1 GND, 2 ~{RESET}, 3 VCC

## MAX809TEUR+T
designator U?
IC MPU/RESET CIRC SOT23-3; Manufacturer: Maxim; Manufacturer Part Number: MAX809TEUR+T; Number of Voltages Monitored: 1; Reset: Active Low; Reset Timeout: 140ms; Threshold Voltage: 3.08V; Min Supply Voltage: 1.2V; Max Supply Voltage: 5.5V; Max Power Dissipation: 320mW; Overvoltage Threshold: 3.11V; Undervoltage Threshold: 3.04V; Operating Supply Current: 17uA; Watchdog Timer: No; Output: TOTEM-POLE; Supplier 1: RSComponents; RoHS: Yes; Category: Voltage Supervisors; Stock 1: 285; Pricing 1: 5=3.24400, 25=2.34200, 100=2.33000, 250=1.89800, 500=1.87800 (GBP); Mount: Surface Mount; Case/Package: SOT-23; Number of Pins: 3; Min Operating Temperature: -40°C; Max Operating Temperature: 105°C; Packaging: Tape and Reel; Type: Simple Reset/Power-On Reset; Package Quantity: 1; Min Reset Threshold Voltage: 3.04V; Max Reset Threshold Voltage: 3.11V; Series: -; Nominal Supply Current: 17uA; Length: 3.04mm; Width: 1.4mm; Height: 1.02mm; Radiation Hardening: No; Lead Free: Lead Free; RoHS Compliant: Yes; ComponentLink1URL: https://datasheet.ciiva.com/1169/max803-max810z-1169881.pdf?src-supplier=Element14; ComponentLink1Description: https://datasheet.ciiva.com/1169/max803-max810z-1169881.pdf?src-supplier=Element14; ComponentLink2URL: https://datasheet.ciiva.com/1973/max803-max810z-1973319.pdf?src-supplier=Digi-Key; ComponentLink2Description: https://datasheet.ciiva.com/1973/max803-max810z-1973319.pdf?src-supplier=Digi-Key; ComponentLink3URL: https://datasheet.ciiva.com/1973/max803-max810z-1973320.pdf?src-supplier=Digi-Key; ComponentLink3Description: https://datasheet.ciiva.com/1973/max803-max810z-1973320.pdf?src-supplier=Digi-Key; ComponentLink4URL: https://datasheet.ciiva.com/1973/max803-max810z-1973318.pdf?src-supplier=Digi-Key; ComponentLink4Description: https://datasheet.ciiva.com/1973/max803-max810z-1973318.pdf?src-supplier=Digi-Key; ComponentLink5URL: https://datasheet.ciiva.com/43495/170148-da-01-en-ic-max809teur-t-sot23-43495557.pdf?src-supplier=Conrad; ComponentLink5Description: https://datasheet.ciiva.com/43495/170148-da-01-en-ic-max809teur-t-sot23-43495557.pdf?src-supplier=Conrad; Supplier Part Number 1: 1901686; LCSC Part Number: C16711; Item Type: IC
footprint SOT-23-3L_
pins: 1 GND, 2 ~{RESET}, 3 VCC

## MAX3051EKA+T
designator U?
IC TXRX CAN 3.3V SOT23-8; Manufacturer: Maxim; Manufacturer Part Number: MAX3051EKA+T; Max Supply Voltage: 3.465V; Min Supply Voltage: 3.135V; Data Rate: 1Mbps; Operating Supply Current: 35mA; Number of Transceivers: 1; Max Supply Current: 70mA; Supplier 1: Mouser; RoHS: Yes; Category: Interface ICs; Stock 1: 31750; Pricing 1: 1=3.87000, 10=3.47000, 50=3.28000, 100=2.85000, 1000=2.19000, 10000=2.11000 (USD); Mount: Surface Mount; Package: SOT-23-8; Number of Pins: 8; Contact Plating: Tin,Matte; Weight: 0.01787oz; Min Operating Temperature: -40°C; Max Operating Temperature: 85°C; Packaging: Tape and Reel; Package Quantity: 1; Interface: CAN; Number of Transmit Buffers: 1; Number of Receive Buffers: 1; Operating Supply Voltage: 3.3V; Series: -; Length: 2.9mm; Width: 1.625mm; Height: 1.25mm; Radiation Hardening: No; RoHS Compliant: Yes; ComponentLink1URL: https://datasheet.ciiva.com/12072/max3051-74908-12072588.pdf?src-supplier=Mouser; ComponentLink1Description: https://datasheet.ciiva.com/12072/max3051-74908-12072588.pdf?src-supplier=Mouser; ComponentLink2URL: https://datasheet.ciiva.com/1711/max3051-1711846.pdf?src-supplier=Digi-Key; ComponentLink2Description: https://datasheet.ciiva.com/1711/max3051-1711846.pdf?src-supplier=Digi-Key; ComponentLink3URL: https://datasheet.ciiva.com/1711/max3051-1711847.pdf?src-supplier=Digi-Key; ComponentLink3Description: https://datasheet.ciiva.com/1711/max3051-1711847.pdf?src-supplier=Digi-Key; ComponentLink4URL: https://datasheet.ciiva.com/1711/max3051-1711845.pdf?src-supplier=Digi-Key; ComponentLink4Description: https://datasheet.ciiva.com/1711/max3051-1711845.pdf?src-supplier=Digi-Key; Supplier Part Number 1: 700-MAX3051EKAT; LCSC Part Number: C112005; Item Type: IC
footprint SOT-23-8
pins: 1 TXD, 2 GND, 3 VCC, 4 RXD, 5 SHDN, 6 CANL, 7 CANH, 8 RS

## MAX3160EAP+T
designator U?
IC TXRX RS232/485/422 20SSOP; Manufacturer: Maxim; Manufacturer Part Number: MAX3160EAP+T; Data Rate: 10Mbps; Simplex/Duplex: Full Duplex; Receiver Hysteresis: 500mV; Propagation Delay: 0.15us; Logic Function: Transceiver; Number of Drivers: 1; Interface: RS-232,RS-422,RS-485; Min Supply Voltage: 3V; Max Supply Voltage: 5.5V; Supply Current: 2.5mA; Supplier 1: Mouser; RoHS: Yes; Category: Buffers, Drivers and Transceivers; Stock 1: 10713; Pricing 1: 1=24.49, 10=22.59, 50=21.57, 100=19.29, 1000=18.4, 10000=18.39 (USD); Mounting Technology: Surface Mount; Case/Package: SSOP; Pins: 20; Min Operating Temperature: 0°C; Max Operating Temperature: 85°C; Packaging: Tape and Reel; Series: -; Package Quantity: 2000; Number of Receivers: 1; RoHS Compliant: Yes; Lead Free: Lead Free; Reach SVHC Compliant: Unknown; ComponentLink1URL: https://datasheet.ciiva.com/12260/max3160-max3162-103470-12260544.pdf?src-supplier=Mouser; ComponentLink1Description: https://datasheet.ciiva.com/12260/max3160-max3162-103470-12260544.pdf?src-supplier=Mouser; ComponentLink2URL: https://datasheet.ciiva.com/14799/max3160-max3162-14799287.pdf?src-supplier=Digi-Key; ComponentLink2Description: https://datasheet.ciiva.com/14799/max3160-max3162-14799287.pdf?src-supplier=Digi-Key; Supplier Part Number 1: 700-MAX3160EAPT; LCSC Part Number: C406604; Item Type: IC
footprint SSOP-20-5.2mm
pins: 1 C1+, 2 VCC, 3  C1-, 4  GND, 5  Z(B)/T1OUT, 6  Y(A)/T2OUT, 7 R1OUT, 8 RO/R2OUT, 9 ~{SHDN}, 10  FAST , 11 RS485~{/RS232}, 12 HDPLX, 13  A/R2IN , 14 B/R1IN, 15 DE485/T2IN, 16 DI/T1IN, 17  V-, 18 C2-, 19  C2+, 20  V+

## MAX3232IDR
designator U?
IC TRANSCEIVER FULL 2/2 16SOIC; Manufacturer: Texas Instruments; Manufacturer Part Number: MAX3232IDR; Min Supply Voltage: 3V; Max Supply Voltage: 5.5V; Data Rate: 250Kbps; Number of Receivers: 2; Operating Supply Voltage: 5V; Logic Function: Transceiver,Receiver; Number of Transceivers: 1; Supply Current: 1mA; Simplex/Duplex: Full Duplex; Receiver Hysteresis: 300mV; Supplier 1: Mouser; RoHS: Yes; Category: Interface ICs; Stock 1: 22181; Pricing 1: 1=2.37, 10=2.37, 50=2.37, 100=2.37, 1000=2.37, 10000=2.37 (USD); Mounting Technology: Surface Mount; Case/Package: D; Pins: 16; Weight: 0.004998oz; Min Operating Temperature: -40°C; Max Operating Temperature: 85°C; Packaging: Tape and Reel; Package Quantity: 1; Number of Transmitters: 2; Number of Drivers: 2; Series: -; Operating Supply Current: 1mA; Lead Free: Lead Free; RoHS Compliant: Yes; Reach SVHC Compliant: No; ComponentLink1URL: https://datasheet.ciiva.com/8064/1882754-8064745.pdf?src-supplier=Element14; ComponentLink1Description: https://datasheet.ciiva.com/8064/1882754-8064745.pdf?src-supplier=Element14; ComponentLink2URL: https://datasheet.ciiva.com/46394/1882754-46394523.pdf?src-supplier=Element14; ComponentLink2Description: https://datasheet.ciiva.com/46394/1882754-46394523.pdf?src-supplier=Element14; ComponentLink3URL: https://datasheet.ciiva.com/46397/1882754-46397996.pdf?src-supplier=Element14; ComponentLink3Description: https://datasheet.ciiva.com/46397/1882754-46397996.pdf?src-supplier=Element14; ComponentLink4URL: https://datasheet.ciiva.com/1701/max3232-1701626.pdf?src-supplier=Digi-Key; ComponentLink4Description: https://datasheet.ciiva.com/1701/max3232-1701626.pdf?src-supplier=Digi-Key; ComponentLink5URL: https://datasheet.ciiva.com/1701/max3232-1701625.pdf?src-supplier=Digi-Key; ComponentLink5Description: https://datasheet.ciiva.com/1701/max3232-1701625.pdf?src-supplier=Digi-Key; ComponentLink6URL: https://datasheet.ciiva.com/1701/max3232-1701627.pdf?src-supplier=Digi-Key; ComponentLink6Description: https://datasheet.ciiva.com/1701/max3232-1701627.pdf?src-supplier=Digi-Key; Supplier Part Number 1: 595-MAX3232IDR; LCSC Part Number: C18261; Item Type: IC
footprint SOIC-16
pins: 1 C1+, 2 V+, 3 C1-, 4 C2+, 5 C2-, 6 V-, 7 DOUT2, 8 RIN2, 9 ROUT2, 10 DIN2, 11 DIN1, 12 ROUT1, 13 RIN1, 14 DOUT1, 15 GND, 16 VCC

## MAX4063ETE+T
designator U?
IC AMP CLASS AB STEREO 16TQFN; Manufacturer: Maxim; Manufacturer Part Number: MAX4063ETE+T; Voltage Gain: 26.02dB; Min Supply Voltage: 2.4V; Max Supply Voltage: 5.5V; Power Supply Rejection Ratio (PSRR): 95dB; Supplier 1: Mouser; RoHS: Yes; Category: Amplifiers - Audio; Stock 1: 23845; Pricing 1: 1=1.88000, 10=1.70000, 50=1.60000, 100=1.37000, 1000=0.96000, 10000=0.92700 (USD); Mount: Surface Mount; Number of Pins: 16; Min Operating Temperature: -40°C; Max Operating Temperature: 85°C; Package Quantity: 2500; Packaging: Tape and Reel; Series: -; Radiation Hardening: No; RoHS Compliant: Yes; ComponentLink1URL: https://datasheet.ciiva.com/1792/max4063-1792007.pdf?src-supplier=Digi-Key; ComponentLink1Description: https://datasheet.ciiva.com/1792/max4063-1792007.pdf?src-supplier=Digi-Key; ComponentLink2URL: https://datasheet.ciiva.com/2968/max4063-2968783.pdf?src-supplier=Avnet; ComponentLink2Description: https://datasheet.ciiva.com/2968/max4063-2968783.pdf?src-supplier=Avnet; Supplier Part Number 1: 700-MAX4063ETET; LCSC Part Number: *; Item Type: IC
footprint 16-TQFN (4x4)
pins: 1 ~{SHDN}, 2 OUT, 3 BIAS, 4 VCC, 5 ADJ, 6 N.C., 7 ~{OUT}, 8 N.C., 9 IN+, 10 IN-, 11 GND, 12 AUX_IN, 13 G1, 14 N.C, 15 G2, 16 ~{INT}/AUX, 17 GND

## MAX4236EUT+T
designator U?
IC OPAMP GP 1.7MHZ RRO SOT23-6; Manufacturer: Maxim; Manufacturer Part Number: MAX4236EUT+T; Common Mode Rejection Ratio: 102dB; Max Supply Voltage: 5.5V; Min Supply Voltage: 2.4V; Voltage Gain: 128dB; Max Power Dissipation: 696mW; Slew Rate: 0.3V/µs; Input Offset Voltage (Vos): 5uV; Input Bias Current: 1pA; Operating Supply Current: 350uA; Number of Channels: 1; Power Supply Rejection Ratio (PSRR): 120dB; Output Current per Channel: 30mA; Supply Type: Single; Dual Supply Voltage: 2.75V; Amplifier Type: GENERAL PURPOSE; Supplier 1: Digi-Key; RoHS: Yes; Category: Amplifiers - Op Amps, Buffer, Instrumentation; Stock 1: 5148; Pricing 1: 1=2.31000, 10=2.07800, 25=1.96000, 100=1.66990, 250=1.56800, 500=1.47000 (USD); Mount: Surface Mount; Case/Package: SOT-23-6; Number of Pins: 6; Contact Plating: Tin,Matte; Min Operating Temperature: -40°C; Max Operating Temperature: 85°C; Gain Bandwidth Product: 1.7MHz; Packaging: Tape and Reel; Package Quantity: 1; Number of Circuits: 1; Bandwidth: 1.7MHz; Nominal Supply Current: 350uA; Number of Amplifiers: 1; Supply Current: 350uA; Series: -; Length: 3mm; Width: 1.75mm; Height: 1.3mm; Radiation Hardening: No; REACH SVHC: Unknown; RoHS Compliant: Yes; ComponentLink1URL: https://datasheet.ciiva.com/26846/max4236eut-t-26846323.pdf?src-supplier=IIIC; ComponentLink1Description: https://datasheet.ciiva.com/26846/max4236eut-t-26846323.pdf?src-supplier=IIIC; ComponentLink2URL: https://datasheet.ciiva.com/1802/max4236-max4237-1802043.pdf?src-supplier=Digi-Key; ComponentLink2Description: https://datasheet.ciiva.com/1802/max4236-max4237-1802043.pdf?src-supplier=Digi-Key; ComponentLink3URL: https://datasheet.ciiva.com/14347/max4236-max4237-14347431.pdf?src-supplier=Avnet; ComponentLink3Description: https://datasheet.ciiva.com/14347/max4236-max4237-14347431.pdf?src-supplier=Avnet; ComponentLink4URL: https://datasheet.ciiva.com/1802/max4236-max4237-1802041.pdf?src-supplier=Digi-Key; ComponentLink4Description: https://datasheet.ciiva.com/1802/max4236-max4237-1802041.pdf?src-supplier=Digi-Key; ComponentLink5URL: https://datasheet.ciiva.com/1802/max4236-max4237-1802042.pdf?src-supplier=Digi-Key; ComponentLink5Description: https://datasheet.ciiva.com/1802/max4236-max4237-1802042.pdf?src-supplier=Digi-Key; ComponentLink6URL: https://datasheet.ciiva.com/17574/max4236-max4237-17574234.pdf?src-supplier=Avnet+Europe; ComponentLink6Description: https://datasheet.ciiva.com/17574/max4236-max4237-17574234.pdf?src-supplier=Avnet+Europe; Supplier Part Number 1: MAX4236EUT+TCT-ND; Item Type: IC
footprint SOT-23-6
pins: 1 OUT, 2 VEE, 3 +, 4 -, 5 ~{SHDN}, 6 VCC

## MAX16054AZT+T
designator U?
IC CNTRLR ON/OFF W/DEB TSOT23-6; Manufacturer: Maxim; Manufacturer Part Number: MAX16054AZT+T; Max Power Dissipation: 727W; Max Supply Voltage: 5.5V; Min Supply Voltage: 2.7V; Number of Voltages Monitored: 1; Undervoltage Threshold: 1.8V; Operating Supply Current: 7uA; Watchdog Timer: No; Output Type: PUSH-PULL; Supplier 1: Arrow Electronics; RoHS: Yes; Category: Interface ICs; Stock 1: 3; Pricing 1: 1=2.99700 (USD); Mounting Technology: Surface Mount; Case/Package: SOT-23-6; Pins: 6; Contact Plating: Tin,Matte; Min Operating Temperature: -40°C; Max Operating Temperature: 125°C; Packaging: Tape and Reel; Package Quantity: 1; Series: -; Length: 4mm; Width: 4mm; Height: 0.73mm; Radiation Hardening: No; RoHS Compliant: Yes; ComponentLink1URL: https://datasheet.ciiva.com/4901/max16054-83881-4901086.pdf?src-supplier=Mouser; ComponentLink1Description: https://datasheet.ciiva.com/4901/max16054-83881-4901086.pdf?src-supplier=Mouser; ComponentLink2URL: https://datasheet.ciiva.com/1784/max16054-1784560.pdf?src-supplier=Digi-Key; ComponentLink2Description: https://datasheet.ciiva.com/1784/max16054-1784560.pdf?src-supplier=Digi-Key; ComponentLink3URL: https://datasheet.ciiva.com/14247/max16054-14247770.pdf?src-supplier=Avnet; ComponentLink3Description: https://datasheet.ciiva.com/14247/max16054-14247770.pdf?src-supplier=Avnet; ComponentLink4URL: https://datasheet.ciiva.com/1784/max16054-1784561.pdf?src-supplier=Digi-Key; ComponentLink4Description: https://datasheet.ciiva.com/1784/max16054-1784561.pdf?src-supplier=Digi-Key; ComponentLink5URL: https://datasheet.ciiva.com/1784/max16054-1784562.pdf?src-supplier=Digi-Key; ComponentLink5Description: https://datasheet.ciiva.com/1784/max16054-1784562.pdf?src-supplier=Digi-Key; Supplier Part Number 1: MAX16054AZT+T; LCSC Part Number: C79401; Item Type: IC
footprint TSOT-23-6
pins: 1 IN, 2 GND, 3 CLEAR, 4 ~{OUT}, 5 OUT, 6 VCC

## MAX16150AWT+
designator U?
IC SUPERVISOR 1 CHANNEL 6WLP; Manufacturer: Analog Devices; Manufacturer Part Number: MAX16150AWT+; Supplier: Mouser; Supplier Part Number: 700-MAX16150AWT+; RoHS: No; Category: Voltage Supervisors; Stock: 13; Pricing: 1=3.1, 10=2.78, 50=2.63, 100=2.28, 1000=1.75, 10000=1.69 (USD); LCSC Part Number: C1019998; Item Type: IC
footprint WLP-6(0.83x1.24)
pins: A1 VCC, A2 GND, A3 ~{PB_IN}, B1 OUT, B2 ~{INT}, B3 ~{CLR}

## MAX17048G+T10
designator U?
IC BATT MON LI-ION 1CELL 8TDFN; Manufacturer: Maxim; Manufacturer Part Number: MAX17048G+T10; Output Voltage: 400mV; Operating Supply Current: 23uA; Operating Supply Voltage: 4.5V; Supplier 1: Mouser; RoHS: Yes; Category: Battery Management; Stock 1: 41293; Pricing 1: 1=3.34000, 10=3.00000, 50=2.84000, 100=2.46000, 1000=1.89000, 10000=1.83000 (USD); Mount: Surface Mount; Number of Pins: 8; Contact Plating: Tin,Matte; Min Operating Temperature: -20°C; Max Operating Temperature: 85°C; Packaging: Tape and Reel; Package Quantity: 10000; Series: ModelGauge™; Radiation Hardening: No; RoHS Compliant: Yes; ComponentLink1URL: https://datasheet.ciiva.com/14083/max17048-max17049-14083973.pdf?src-supplier=Digi-Key; ComponentLink1Description: https://datasheet.ciiva.com/14083/max17048-max17049-14083973.pdf?src-supplier=Digi-Key; Supplier Part Number 1: 700-MAX17048G+T10; LCSC Part Number: C2682616; Item Type: IC
footprint 8-TDFN-EP (2x2)
pins: 1 CTG, 2 CELL, 3 VDD, 4 GND, 5 ~{ALRT}, 6 QSTRT, 7 SCL, 8 SDA, 9 GND